# Altium footprint library Dlib.PcbLib: 70 footprints (part 4 of 5)
Each footprint in its own frame and in the unit in brackets; x right, y up, seen from the top. Pads: shape width x height; smd on the part's side, far side on the other; paste and mask are expansions set on the pad; w line width, h text height; cw(c..) or ccw(c..) is an arc to the next point about the centre after c.
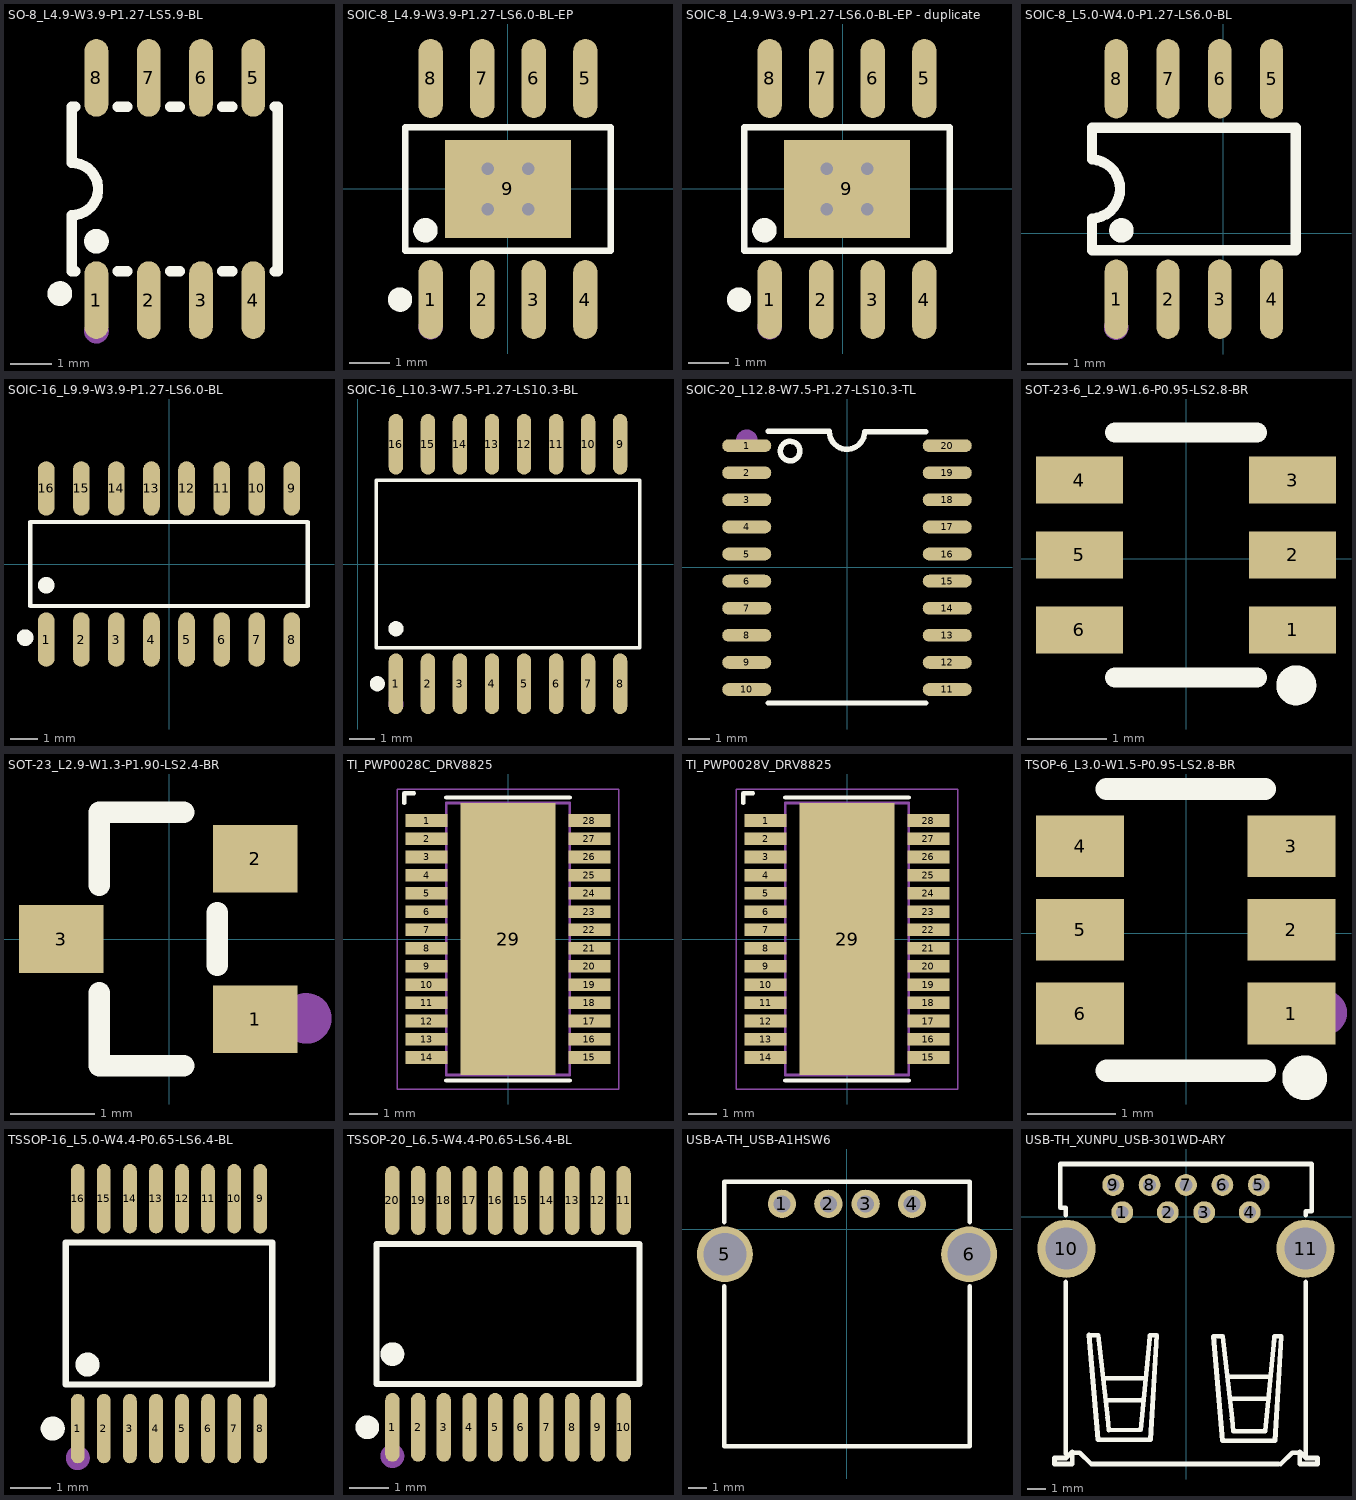
[diagram p3: the footprints below, top view; thin cyan lines are the x and y axes]

## SO-8_L4.9-W3.9-P1.27-LS5.9-BL [mm]
pads (8):
  oval 0.574x1.888 smd paste+0 mask+0.051: 1(455.192,-345.31) 2(456.462,-345.31) 3(457.732,-345.31) 4(459.002,-345.31) 5(459.002,-339.912) 6(457.732,-339.912) 7(456.462,-339.912) 8(455.192,-339.912)
Top Overlay:
  circle w0.3: c454.303,-345.151 r0.15
  circle w0.3: c455.192,-343.881 r0.15
  lines w0.254: 454.597,-341.976 454.597,-340.611 454.675,-340.611 ; 454.597,-341.976 cw(c454.597,-342.611) 454.597,-343.246 454.597,-344.611 454.675,-344.611 ; 455.708,-344.611 455.945,-344.611 ; 455.708,-340.611 455.945,-340.611 ; 456.978,-344.611 457.215,-344.611 ; 456.978,-340.611 457.215,-340.611 ; 458.248,-344.611 458.485,-344.611 ; 458.248,-340.611 458.485,-340.611 ; 459.518,-344.611 459.596,-344.611 459.596,-340.611 459.518,-340.611
Mechanical 15:
  circle w0.3: c455.192,-346.061 r0.15
3D body "MAX31855KASA+T.STEP": height 1.75, standoff 0, extent 454.648,-345.57 459.548,-339.57

## SOIC-8_L4.9-W3.9-P1.27-LS6.0-BL-EP [mm]
pads (9):
  oval 0.602x1.941 smd paste+0 mask+0.051: 1(-1.904,-2.72) 2(-0.634,-2.72) 3(0.636,-2.72) 4(1.906,-2.72) 5(1.906,2.72) 6(0.636,2.72) 7(-0.634,2.72) 8(-1.904,2.72)
  rect 3.098x2.41 smd paste+0 mask+0.051: 9(0.001,0)
via 0.502,-0.5 diameter 0.61 hole 0.305
via -0.498,-0.5 diameter 0.61 hole 0.305
via 0.502,0.5 diameter 0.61 hole 0.305
via -0.498,0.5 diameter 0.61 hole 0.305
Top Overlay:
  circle w0.3: c-2.657,-2.721 r0.15
  circle w0.3: c-2.031,-1.016 r0.15
  lines w0.152: -2.525,-1.521 2.528,-1.521 2.528,1.521 -2.525,1.521 -2.525,-1.521
Mechanical 15:
  circle w0.3: c-1.904,-3.4 r0.15

## SOIC-8_L4.9-W3.9-P1.27-LS6.0-BL-EP - duplicate [mm]
pads (9):
  oval 0.602x1.941 smd paste+0 mask+0.051: 1(-1.802,-2.72) 2(-0.532,-2.72) 3(0.738,-2.72) 4(2.008,-2.72) 5(2.008,2.72) 6(0.738,2.72) 7(-0.532,2.72) 8(-1.802,2.72)
  rect 3.098x2.41 smd paste+0 mask+0.051: 9(0.103,0)
via 0.603,-0.5 diameter 0.61 hole 0.305
via -0.397,-0.5 diameter 0.61 hole 0.305
via 0.603,0.5 diameter 0.61 hole 0.305
via -0.397,0.5 diameter 0.61 hole 0.305
Top Overlay:
  circle w0.3: c-2.555,-2.721 r0.15
  circle w0.3: c-1.929,-1.016 r0.15
  lines w0.152: -2.423,-1.521 2.629,-1.521 2.629,1.521 -2.423,1.521 -2.423,-1.521
Mechanical 15:
  circle w0.3: c-1.802,-3.4 r0.15

## SOIC-8_L5.0-W4.0-P1.27-LS6.0-BL [mm]
pads (8):
  oval 0.568x1.95 smd paste+0 mask+0.051: 1(-2.622,-1.623) 2(-1.352,-1.623) 3(-0.082,-1.623) 4(1.188,-1.623) 5(1.188,3.787) 6(-0.082,3.787) 7(-1.352,3.787) 8(-2.622,3.787)
Top Overlay:
  circle w0.3: c-2.495,0.066 r0.15
  lines w0.254: -3.217,1.809 -3.217,2.582 1.783,2.582 1.783,-0.418 -3.217,-0.418 -3.217,0.356 ccw(c-3.257,1.082) -3.212,1.809
Mechanical 15:
  circle w0.3: c-2.622,-2.318 r0.15

## SOIC-16_L9.9-W3.9-P1.27-LS6.0-BL [mm]
pads (16):
  oval 0.602x1.971 smd: 1(-4.445,-2.736) 2(-3.175,-2.736) 3(-1.905,-2.736) 4(-0.635,-2.736) 5(0.635,-2.736) 6(1.905,-2.736) 7(3.175,-2.736) 8(4.445,-2.736) 9(4.445,2.736) 10(3.175,2.736) 11(1.905,2.736) 12(0.635,2.736) 13(-0.635,2.736) 14(-1.905,2.736) 15(-3.175,2.736) 16(-4.445,2.736)
Top Overlay:
  lines w0.152: -5.026,-1.521 -5.026,1.521 5.026,1.521 5.026,-1.521 -5.026,-1.521
  lines w0.3: -5.357,-2.667 -5.354,-2.696 -5.346,-2.724 -5.332,-2.75 -5.313,-2.773 -5.29,-2.792 -5.264,-2.806 -5.236,-2.814 -5.207,-2.817 -5.178,-2.814 -5.15,-2.806 -5.124,-2.792 -5.101,-2.773 -5.082,-2.75 -5.068,-2.724 -5.06,-2.696 -5.057,-2.667 -5.06,-2.638 -5.068,-2.61 -5.082,-2.584 -5.101,-2.561 -5.124,-2.542 -5.15,-2.528 -5.178,-2.52 -5.207,-2.517 -5.236,-2.52 -5.264,-2.528 -5.29,-2.542 -5.313,-2.561 -5.332,-2.584 -5.346,-2.61 -5.354,-2.638 -5.357,-2.667 ; -4.595,-0.769 -4.592,-0.798 -4.584,-0.827 -4.57,-0.853 -4.551,-0.875 -4.528,-0.894 -4.502,-0.908 -4.474,-0.916 -4.445,-0.919 -4.416,-0.916 -4.388,-0.908 -4.362,-0.894 -4.339,-0.875 -4.32,-0.853 -4.306,-0.827 -4.298,-0.798 -4.295,-0.769 -4.298,-0.74 -4.306,-0.712 -4.32,-0.686 -4.339,-0.663 -4.362,-0.644 -4.388,-0.63 -4.416,-0.622 -4.445,-0.619 -4.474,-0.622 -4.502,-0.63 -4.528,-0.644 -4.551,-0.663 -4.57,-0.686 -4.584,-0.712 -4.592,-0.74 -4.595,-0.769
3D body "C15846.step": height 1.9, standoff 0, extent -4.95,-3.003 4.95,3.003

## SOIC-16_L10.3-W7.5-P1.27-LS10.3-BL [mil]
pads (16):
  oval 22.6x94.51 smd paste+0 mask+2: 1(59.5,-187.02) 2(109.5,-187.02) 3(159.5,-187.02) 4(209.5,-187.02) 5(259.5,-187.02) 6(309.5,-187.02) 7(359.5,-187.02) 8(409.5,-187.02) 9(409.5,187.02) 10(359.5,187.02) 11(309.5,187.02) 12(259.5,187.02) 13(209.5,187.02) 14(159.5,187.02) 15(109.5,187.02) 16(59.5,187.02)
Top Overlay:
  circle w11.81: c30.39,-187.02 r5.91
  circle w11.81: c59.5,-101.14 r5.91
  lines w6: 28.74,-130.76 440.26,-130.76 440.26,130.76 28.74,130.76 28.74,-130.76
Mechanical 15:
  circle w11.81: c59.5,-219 r5.91
3D body "ISO7740DWR.STEP": height 104.33, standoff 0, extent 32.24,-202.76 437.76,202.76

## SOIC-20_L12.8-W7.5-P1.27-LS10.3-TL [mm]
pads (20):
  oval 2.3x0.6 smd paste+0 mask+0.051: 1(-4.7,5.696) 2(-4.7,4.426) 3(-4.7,3.156) 4(-4.7,1.886) 5(-4.7,0.616) 6(-4.7,-0.654) 7(-4.7,-1.924) 8(-4.7,-3.194) 9(-4.7,-4.464) 10(-4.7,-5.734) 11(4.7,-5.734) 12(4.7,-4.464) 13(4.7,-3.194) 14(4.7,-1.924) 15(4.7,-0.654) 16(4.7,0.616) 17(4.7,1.886) 18(4.7,3.156) 19(4.7,4.426) 20(4.7,5.696)
Top Overlay:
  circle w0.254: c-2.667,5.442 r0.458
  lines w0.254: -3.683,-6.369 -3.096,-6.369 3.048,-6.369 3.683,-6.369 ; -3.683,6.369 -0.825,6.369 ccw(c0,6.356) 0.826,6.343 3.683,6.343
Mechanical 15:
  circle w0.5: c-4.699,5.95 r0.25
3D body "74HC244D--3DModel-STEP-56544.STEP": height 2.5, standoff 0, extent -5.15,-6.4 5.15,6.4

## SOT-23-6_L2.9-W1.6-P0.95-LS2.8-BR [mm]
pads (6):
  rect 1.1x0.6 smd paste+0 mask+0.051: 1(1.35,-0.899) 2(1.35,0.051) 3(1.35,1.001) 4(-1.35,1.001) 5(-1.35,0.051) 6(-1.35,-0.899)
Top Overlay:
  circle w0.254: c1.397,-1.6 r0.127
  lines w0.254: -0.9,-1.5 0.9,-1.5 ; -0.9,1.6 0.9,1.6
Mechanical 15:
  circle w0.2: c1.4,-0.899 r0.1
3D body "PT4103_C19861_SOT23-6.step": height 1.6, standoff -0.05, extent -1.406,-1.45 1.406,1.45

## SOT-23_L2.9-W1.3-P1.90-LS2.4-BR [mm]
pads (3):
  rect 1x0.8 smd paste+0 mask+0.051: 1(1.024,-0.95) 2(1.024,0.95) 3(-1.276,0)
Top Overlay:
  lines w0.254: -0.826,-0.636 -0.826,-1.5 0.174,-1.5 ; -0.826,0.636 -0.826,1.5 0.174,1.5 ; 0.574,-0.314 0.574,0.314
Mechanical 15:
  circle w0.3: c1.626,-0.94 r0.15
3D body "SQ2310ES-T1-GE3.STEP": height 1.12, standoff 0, extent -1.185,-1.46 1.185,1.46

## TI_PWP0028C_DRV8825 [mm]
pads (29):
  rect 1.5x0.45 smd paste+0 mask+0.05: 1(-2.9,4.225) 2(-2.9,3.575) 3(-2.9,2.925) 4(-2.9,2.275) 5(-2.9,1.625) 6(-2.9,0.975) 7(-2.9,0.325) 8(-2.9,-0.325) 9(-2.9,-0.975) 10(-2.9,-1.625) 11(-2.9,-2.275) 12(-2.9,-2.925) 13(-2.9,-3.575) 14(-2.9,-4.225) 15(2.9,-4.225) 16(2.9,-3.575) 17(2.9,-2.925) 18(2.9,-2.275) 19(2.9,-1.625) 20(2.9,-0.975) 21(2.9,-0.325) 22(2.9,0.325) 23(2.9,0.975) 24(2.9,1.625) 25(2.9,2.275) 26(2.9,2.925) 27(2.9,3.575) 28(2.9,4.225)
  rect 3.4x9.7 smd paste-10 mask-10: 29(0,0)
Top Overlay:
  lines w0.15: -3.7,4.85 -3.7,5.2 -3.35,5.2 ; -2.2,-5.05 2.2,-5.05 ; -2.2,5.05 2.2,5.05
Top Paste:
  rectangle: -1.55,-2.59 1.55,2.59
Top Solder:
  rectangle: -1.55,-2.59 1.55,2.59
Mechanical 1:
  lines w0.1: -2.2,-4.85 2.2,-4.85 2.2,4.85 -2.2,4.85 -2.2,-4.85
Mechanical 15:
  lines w0.05: -3.95,-5.35 3.95,-5.35 3.95,5.35 -3.95,5.35 -3.95,-5.35

## TI_PWP0028V_DRV8825 [mm]
pads (29):
  rect 1.5x0.45 smd paste+0 mask+0.05: 1(-2.9,4.225) 2(-2.9,3.575) 3(-2.9,2.925) 4(-2.9,2.275) 5(-2.9,1.625) 6(-2.9,0.975) 7(-2.9,0.325) 8(-2.9,-0.325) 9(-2.9,-0.975) 10(-2.9,-1.625) 11(-2.9,-2.275) 12(-2.9,-2.925) 13(-2.9,-3.575) 14(-2.9,-4.225) 15(2.9,-4.225) 16(2.9,-3.575) 17(2.9,-2.925) 18(2.9,-2.275) 19(2.9,-1.625) 20(2.9,-0.975) 21(2.9,-0.325) 22(2.9,0.325) 23(2.9,0.975) 24(2.9,1.625) 25(2.9,2.275) 26(2.9,2.925) 27(2.9,3.575) 28(2.9,4.225)
  rect 3.4x9.7 smd paste-10 mask-10: 29(0,0)
Top Overlay:
  lines w0.15: -3.7,4.85 -3.7,5.2 -3.35,5.2 ; -2.2,-5.05 2.2,-5.05 ; -2.2,5.05 2.2,5.05
Top Paste:
  rectangle: -1.47,-2.81 1.47,2.81
Top Solder:
  rectangle: -1.47,-2.81 1.47,2.81
Mechanical 1:
  lines w0.1: -2.2,-4.85 2.2,-4.85 2.2,4.85 -2.2,4.85 -2.2,-4.85
Mechanical 15:
  lines w0.05: -3.95,-5.35 3.95,-5.35 3.95,5.35 -3.95,5.35 -3.95,-5.35

## TSOP-6_L3.0-W1.5-P0.95-LS2.8-BR [mm]
pads (6):
  rect 1x0.7 smd paste+0 mask+0.051: 1(1.198,-0.91) 2(1.198,0.04) 3(1.198,0.99) 4(-1.202,0.99) 5(-1.202,0.04) 6(-1.202,-0.91)
Top Overlay:
  circle w0.254: c1.348,-1.64 r0.127
  lines w0.254: -0.902,-1.56 0.898,-1.56 ; -0.902,1.64 0.898,1.64
Mechanical 15:
  circle w0.254: c1.575,-0.902 r0.127
3D body "TLV493D-A1B6.STEP": height 1.1, standoff 0, extent -1.25,-1.45 1.25,1.45

## TSSOP-16_L5.0-W4.4-P0.65-LS6.4-BL [mm]
pads (16):
  oval 0.343x1.731 smd paste+0 mask+0.051: 1(454.88,-345.345) 2(455.53,-345.345) 3(456.18,-345.345) 4(456.83,-345.345) 5(457.48,-345.345) 6(458.13,-345.345) 7(458.78,-345.345) 8(459.43,-345.345) 9(459.43,-339.613) 10(458.78,-339.613) 11(458.13,-339.613) 12(457.48,-339.613) 13(456.83,-339.613) 14(456.18,-339.613) 15(455.53,-339.613) 16(454.88,-339.613)
Top Overlay:
  circle w0.3: c455.123,-343.749 r0.15
  circle w0.3: c454.256,-345.345 r0.15
  lines w0.152: 454.579,-344.25 454.579,-340.708 459.731,-340.708 459.731,-344.25 454.579,-344.25
Mechanical 15:
  circle w0.3: c454.88,-346.079 r0.15
3D body "ADS1220IPWR.STEP": height 1.2, standoff 0, extent 454.649,-345.617 459.649,-339.217

## TSSOP-20_L6.5-W4.4-P0.65-LS6.4-BL [mm]
pads (20):
  oval 0.364x1.742 smd paste+0 mask+0.051: 1(452.736,-344.456) 2(453.386,-344.456) 3(454.036,-344.456) 4(454.686,-344.456) 5(455.336,-344.456) 6(455.986,-344.456) 7(456.636,-344.456) 8(457.286,-344.456) 9(457.936,-344.456) 10(458.586,-344.456) 11(458.586,-338.714) 12(457.936,-338.714) 13(457.286,-338.714) 14(456.636,-338.714) 15(455.986,-338.714) 16(455.336,-338.714) 17(454.686,-338.714) 18(454.036,-338.714) 19(453.386,-338.714) 20(452.736,-338.714)
Top Overlay:
  circle w0.3: c452.102,-344.456 r0.15
  circle w0.3: c452.736,-342.604 r0.15
  lines w0.152: 452.335,-343.357 458.987,-343.357 458.987,-339.814 452.335,-339.814 452.335,-343.357
Mechanical 15:
  circle w0.3: c452.736,-345.185 r0.15
3D body "STM32F030F4P6--3DModel-STEP-269445.STEP": height 1.21, standoff 0.01, extent 452.4,-344.75 458.9,-338.35

## USB-A-TH_USB-A1HSW6 [mil]
pads (6):
  round 60 hole 36: 1(-137.79,53.35) 2(-39.37,53.35) 3(39.37,53.35) 4(137.8,53.35)
  round 118.11 hole 90.55: 5(-258.66,-53.34) 6(258.66,-53.34)
Top Overlay:
  lines w10: -260,-121.49 -260,-460 260,-460 260,-121.49 ; -260,14.79 -260,100 260,100 260,15
3D body "C3197959.step": height 10.24, standoff -414.96, extent -285.43,-457.56 285.43,97.56

## USB-TH_XUNPU_USB-301WD-ARY [mm]
pads (11):
  round 1.2 hole 0.7: 1(-3.5,0.25) 2(-1,0.25) 3(1,0.25) 4(3.5,0.25) 5(4,1.75) 6(2,1.75) 7(0,1.75) 8(-2,1.75) 9(-4,1.75)
  round 3.2 hole 2.3: 10(-6.57,-1.75) 11(6.57,-1.75)
Top Overlay:
  lines w0.254: -6.6,-13 -6.6,-3.581 ; -6.6,0.081 -6.6,0.5 -6.9,0.5 -6.9,2.9 6.9,2.9 6.9,0.3 6.583,0.3 6.583,0.081 ; -6.25,-12.917 -6.583,-13.25 -7.225,-13.25 -7.225,-13.58 -6.25,-13.58 -6.25,-12.953 -5.828,-12.953 -5.201,-13.58 5.1,-13.58 ; -4.491,-8.863 -2.23,-8.863 ; -4.351,-10.073 -2.321,-10.073 ; 2.359,-8.793 4.619,-8.793 ; 2.499,-10.003 4.529,-10.003 ; 5.201,-13.58 5.828,-12.953 6.25,-12.953 6.25,-13.58 7.225,-13.58 7.225,-13.25 6.583,-13.25 ; 6.25,-12.917 6.583,-13.25 ; 6.583,-3.581 6.583,-13.25 ; -5.328,-6.497 -4.833,-12.232 -1.95,-12.243 -1.6,-6.5 -1.98,-6.5 -2.01,-6.93 -2.484,-11.708 -4.234,-11.719 -4.309,-11.041 -4.819,-6.5 -5.328,-6.497 ; 1.511,-6.566 2.006,-12.301 4.889,-12.312 5.239,-6.57 4.859,-6.57 4.829,-7 4.355,-11.778 2.605,-11.788 2.53,-11.11 2.02,-6.57 1.511,-6.566
3D body "C2895025.step": height 7.95, standoff -3, extent -7.903,-13.73 7.903,2.77